# Altium footprint library Transistors_Relays.PcbLib: 10 footprints
Each footprint in its own frame and in the unit in brackets; x right, y up, seen from the top. Pads: shape width x height; smd on the part's side, far side on the other; paste and mask are expansions set on the pad; w line width, h text height; cw(c..) or ccw(c..) is an arc to the next point about the centre after c.
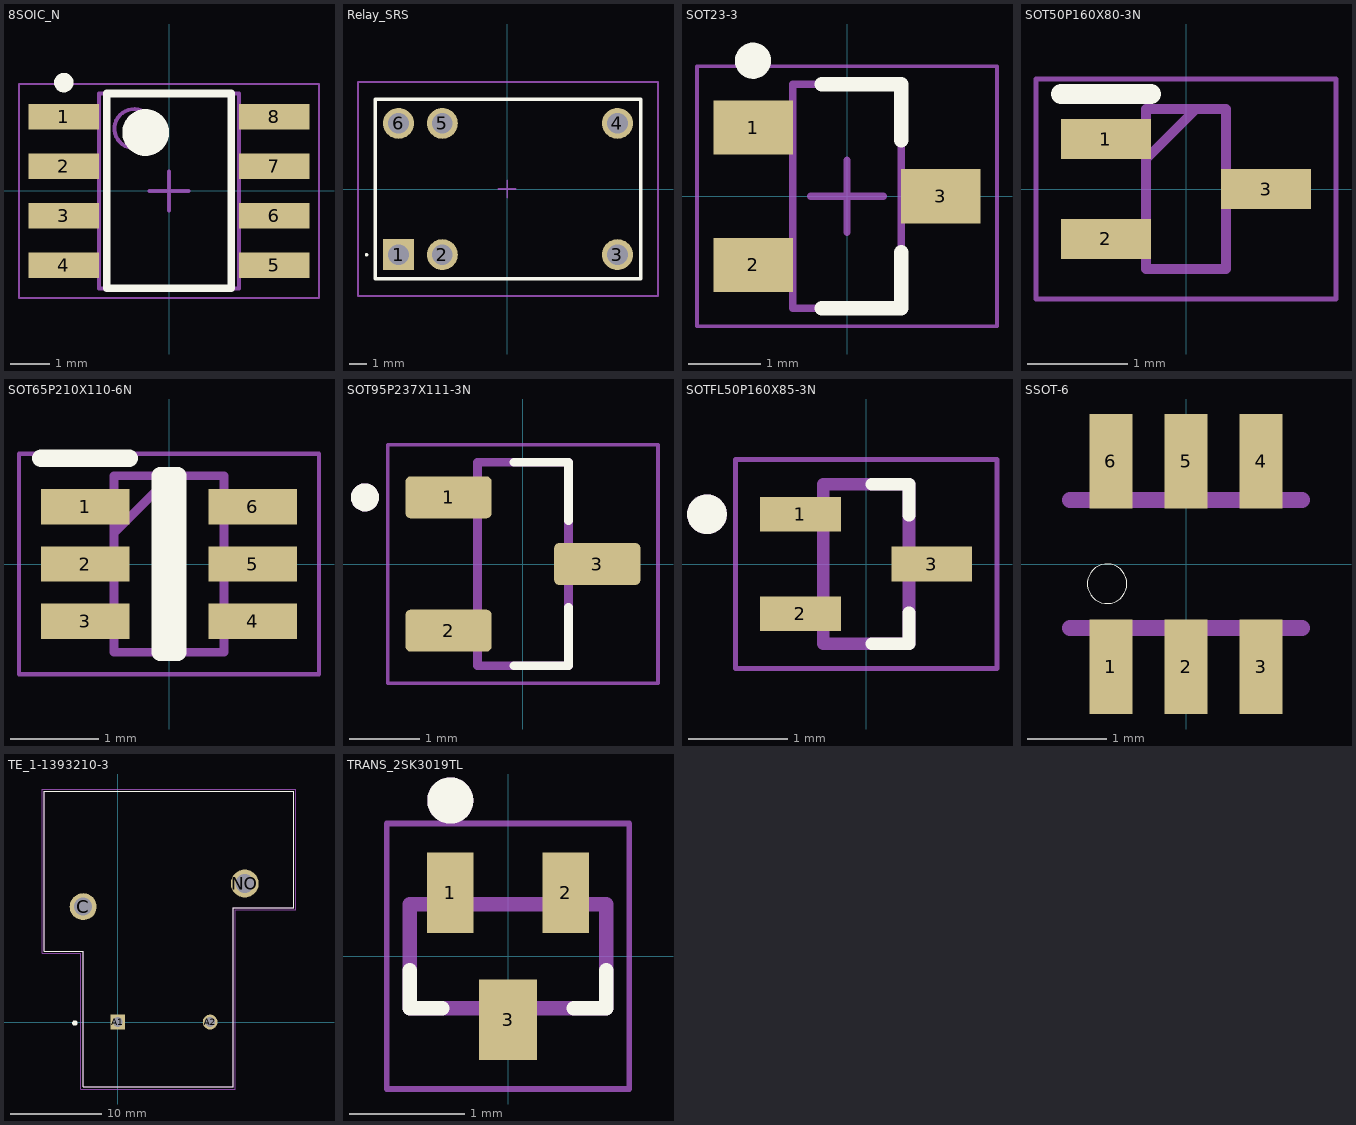
[diagram p0: the footprints below, top view; thin cyan lines are the x and y axes]

## 8SOIC_N [mm] "SOIC, 8-Leads, Body 4,90x3,90mm, Pitch 1,27mm, IPC Medium Density"
height 1.75
pads (8):
  rect 1.8x0.65 smd: 1(-2.7,1.905) 2(-2.7,0.635) 3(-2.7,-0.635) 4(-2.7,-1.905) 5(2.7,-1.905) 6(2.7,-0.635) 7(2.7,0.635) 8(2.7,1.905)
Top Overlay:
  circle w0.6: c-0.6,1.5 r0.3
  circle w0.25: c-2.7,2.78 r0.125
  lines w0.2: -1.6,-2.5 1.6,-2.5 1.6,2.5 -1.6,2.5 -1.6,-2.5
Mechanical 13:
  circle w0.1: c-0.9,1.6 r0.5
  lines w0.1: -1.8,-2.5 1.8,-2.5 1.8,2.5 -1.8,2.5 -1.8,-2.5
Mechanical 15:
  lines w0.05: -3.85,-2.75 3.85,-2.75 3.85,2.75 -3.85,2.75 -3.85,-2.75
  lines w0.1: -0.5,0 0.5,0 ; 0,-0.5 0,0.5
3D body: height 1.75, standoff 0.01, extent -2,-2.5 2,2.5

## Relay_SRS [mm]
pads (6):
  rect 1.8x1.8 hole 1.2: 1(-6.304,-3.81)
  round 1.8 hole 1.2: 2(-3.764,-3.81) 3(6.396,-3.81) 4(6.396,3.81) 5(-3.764,3.81) 6(-6.304,3.81)
Top Overlay:
  lines w0.1: -8.204,-3.81 cw(c-8.154,-3.81) -8.104,-3.81 cw(c-8.154,-3.81) -8.204,-3.81
  lines w0.2: -7.654,-5.2 7.746,-5.2 7.746,5.2 -7.654,5.2 -7.654,-5.2
Mechanical 13:
  lines w0.1: -7.654,-5.2 7.746,-5.2 7.746,5.2 -7.654,5.2 -7.654,-5.2
Mechanical 15:
  lines w0.1: -0.5,0 0.5,0 ; 0,-0.5 0,0.5 ; -8.654,-6.2 8.746,-6.2 8.746,6.2 -8.654,6.2 -8.654,-6.2
3D body "SRS-03VDC-SH.stp": height 11.7, standoff -5, extent -7.654,-5.2 7.746,5.2

## SOT23-3 [mm] "SOT23, 3-Leads, Body 2,95x2,45mm, Pitch 0,95mm, IPC Medium Density"
height 1.1
pads (3):
  rect 1.1x0.75 smd: 1(-1.3,0.95) 2(-1.3,-0.95) 3(1.3,0)
Top Overlay:
  circle w0.25: c-1.3,1.875 r0.125
  lines w0.2: -0.35,-1.55 0.75,-1.55 0.75,-0.775 ; -0.35,1.55 0.75,1.55 0.75,0.775
Mechanical 13:
  lines w0.1: -0.75,-1.55 -0.75,1.55 0.75,1.55 0.75,-1.55 -0.75,-1.55
Mechanical 15:
  lines w0.05: -2.075,-1.8 -2.075,1.8 2.075,1.8 2.075,-1.8 -2.075,-1.8
  lines w0.1: -0.5,0 0.5,0 ; 0,-0.5 0,0.5
3D body: height 1.1, standoff 0.05, extent -0.75,-1.55 0.75,1.55

## SOT50P160X80-3N [mm]
pads (3):
  rect 0.9x0.4 smd: 1(-0.8,0.5) 2(-0.8,-0.5) 3(0.8,0)
Top Overlay:
  lines w0.2: -1.25,0.95 -0.35,0.95
Mechanical 13:
  lines w0.05: -1.5,-1.1 -1.5,1.1 1.5,1.1 1.5,-1.1 -1.5,-1.1
  lines w0.1: -0.4,0.3 0.1,0.8 ; -0.4,-0.8 -0.4,0.8 0.4,0.8 0.4,-0.8 -0.4,-0.8
3D body "step_temp.STEP": height 0.8, standoff 0, extent -0.8,-0.8 0.8,0.8

## SOT65P210X110-6N [mm]
pads (6):
  rect 1x0.4 smd: 1(-0.95,0.65) 2(-0.95,0) 3(-0.95,-0.65) 4(0.95,-0.65) 5(0.95,0) 6(0.95,0.65)
Top Overlay:
  lines w0.2: -1.45,1.2 -0.45,1.2 ; -0.1,-1 -0.1,1 0.1,1 0.1,-1 -0.1,-1
Mechanical 15:
  lines w0.1: -0.625,0.35 0.025,1 ; -0.625,-1 -0.625,1 0.625,1 0.625,-1 -0.625,-1
Mechanical 20:
  lines w0.05: -1.7,-1.25 -1.7,1.25 1.7,1.25 1.7,-1.25 -1.7,-1.25

## SOT95P237X111-3N [mm]
height 1.11
pads (3):
  rrect25% 1.23x0.6 smd paste+0 mask+0.102: 1(-1.06,0.95) 2(-1.06,-0.95) 3(1.06,0)
Top Overlay:
  circle w0.2: c-2.25,0.95 r0.1
  lines w0.127: -0.125,-1.45 0.65,-1.45 0.65,-0.62 ; -0.125,1.45 0.65,1.45 0.65,0.62
Mechanical 13:
  circle w0.2: c-2.25,0.95 r0.1
  lines w0.127: -0.65,-1.45 0.65,-1.45 0.65,1.45 -0.65,1.45 -0.65,-1.45
Mechanical 15:
  lines w0.05: -1.925,-1.7 1.925,-1.7 1.925,1.7 -1.925,1.7 -1.925,-1.7
3D body "step_temp.STEP": height 1.11, standoff 0, extent -1.2,-1.45 1.2,1.45

## SOTFL50P160X85-3N [mm]
height 0.85
pads (3):
  rect 0.81x0.35 smd: 1(-0.66,0.5) 2(-0.66,-0.5) 3(0.66,0)
Top Overlay:
  circle w0.2: c-1.6,0.5 r0.1
  lines w0.127: 0.058,-0.8 0.43,-0.8 0.43,-0.489 ; 0.058,0.8 0.43,0.8 0.43,0.489
Mechanical 13:
  circle w0.2: c-1.6,0.5 r0.1
  lines w0.127: -0.43,-0.8 0.43,-0.8 0.43,0.8 -0.43,0.8 -0.43,-0.8
Mechanical 15:
  lines w0.05: -1.315,-1.05 1.315,-1.05 1.315,1.05 -1.315,1.05 -1.315,-1.05
3D body "step_temp.STEP": height 0.85, standoff 0, extent -0.8,-0.8 0.8,0.8

## SSOT-6 [mm]
pads (6):
  rect 0.55x1.2 smd: 1(-0.95,-1.3) 2(0,-1.3) 3(0.95,-1.3) 4(0.95,1.3) 5(0,1.3) 6(-0.95,1.3)
Top Overlay:
  circle w0: c-1,-0.25 r0.25
Mechanical 13:
  region: -0.7,-1.503 -1.202,-1.503 -1.202,-0.85 -0.7,-0.85
  region: 0.25,-1.502 -0.25,-1.502 -0.25,-0.85 0.25,-0.85
  region: 1.2,-1.502 0.701,-1.502 0.701,-0.85 1.2,-0.85
  region: 1.2,0.851 0.7,0.851 0.7,1.5 1.2,1.5
  region: 0.25,0.85 -0.25,0.85 -0.25,1.5 0.25,1.5
  region: -0.7,0.851 -1.201,0.851 -1.201,1.5 -0.7,1.5
  lines w0.203: -1.472,-0.81 1.472,-0.81 ; -1.472,0.81 1.472,0.81
3D body "step_temp.STEP": height 1.1, standoff 0, extent -1.375,-1.475 1.375,1.475

## TE_1-1393210-3 [mm]
pads (4):
  rect 1.635x1.635 / inner round 1.635 / far side rect 1.635x1.635 hole 1.09: A1(0,0)
  round 1.635 hole 1.09: A2(10.16,0)
  round 2.97 hole 1.98: C(-3.81,12.7)
  round 3.076 hole 2.06: NO(13.97,15.24)
Top Overlay:
  circle w0.3: c-4.72,-0.1 r0.15
  lines w0.127: -8.08,7.8 -3.81,7.8 -3.81,-7.11 12.7,-7.11 12.7,12.6 19.35,12.6 19.35,25.4 -8.08,25.4 -8.08,7.8
Mechanical 13:
  lines w0.127: -8.08,7.8 -3.81,7.8 -3.81,-7.11 12.7,-7.11 12.7,12.6 19.35,12.6 19.35,25.4 -8.08,25.4 -8.08,7.8
Mechanical 15:
  lines w0.05: -8.33,7.55 -8.33,25.65 19.6,25.65 19.6,12.35 12.95,12.35 12.95,-7.36 -4.06,-7.36 -4.06,7.55 -8.33,7.55
3D body "step_temp.STEP": height 20.4, standoff -3.71, extent -8.001,-7.111 19.431,25.399

## TRANS_2SK3019TL [mm]
pads (3):
  rect 0.4x0.7 smd: 1(-0.5,0.55) 2(0.5,0.55)
  rect 0.5x0.7 smd: 3(0,-0.55)
Top Overlay:
  circle w0.2: c-0.5,1.35 r0.1
  lines w0.127: -0.85,-0.12 -0.85,-0.45 -0.57,-0.45 ; 0.57,-0.45 0.85,-0.45 0.85,-0.12
Mechanical 13:
  circle w0.2: c-0.5,1.35 r0.1
  lines w0.127: -0.85,-0.45 -0.85,0.45 0.85,0.45 0.85,-0.45 -0.85,-0.45
Mechanical 15:
  lines w0.05: -1.05,-1.15 1.05,-1.15 1.05,1.15 -1.05,1.15 -1.05,-1.15
3D body "step_temp.STEP": height 0.8, standoff 0, extent -0.8,-0.8 0.8,0.8